# Altium schematic symbol library Edge Connector PCB with Solder Pads.SchLib: 3 symbols
Pins are listed as number, name and electrical type; pins without a type are passive.

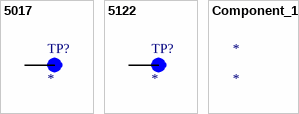
[diagram p0: symbols 5017 to Component_1]

## 5017
designator TP?
SMT Test Point- Micro Mininature-5000 pc Reels; MF: Keystone Electronics; MP: 5017; SnapEDA_Link: https://www.snapeda.com/parts/5017/Keystone+Electronics/view-part/?ref=snap; Package: None; Value: *; Check_prices: https://www.snapeda.com/parts/5017/Keystone+Electronics/view-part/?ref=eda
footprint KEYSTONE_5017
pins: TP

## 5122
designator TP?
Blue PC Test Point, Compact Phosphor Bronze Silver Plating 0.063 (1.60mm) Hole Diameter Mounting Type; MF: Keystone Electronics; MP: 5122; Purchase-URL: https://pricing.snapeda.com/search?q=5122&ref=eda; Package: None; Check_prices: https://www.snapeda.com/parts/5122/Keystone+Electronics/view-part/?ref=eda; Value: *; SnapEDA_Link: https://www.snapeda.com/parts/5122/Keystone+Electronics/view-part/?ref=snap; Digi-Key_Part_Number: 36-5122-ND
footprint KEYSTONE_5122
pins: TP

## Component_1
designator *